# Altium footprint library TXU0202DCUR.PcbLib: 3 footprints
Each footprint in its own frame and in the unit in brackets; x right, y up, seen from the top. Pads: shape width x height; smd on the part's side, far side on the other; paste and mask are expansions set on the pad; w line width, h text height; cw(c..) or ccw(c..) is an arc to the next point about the centre after c.
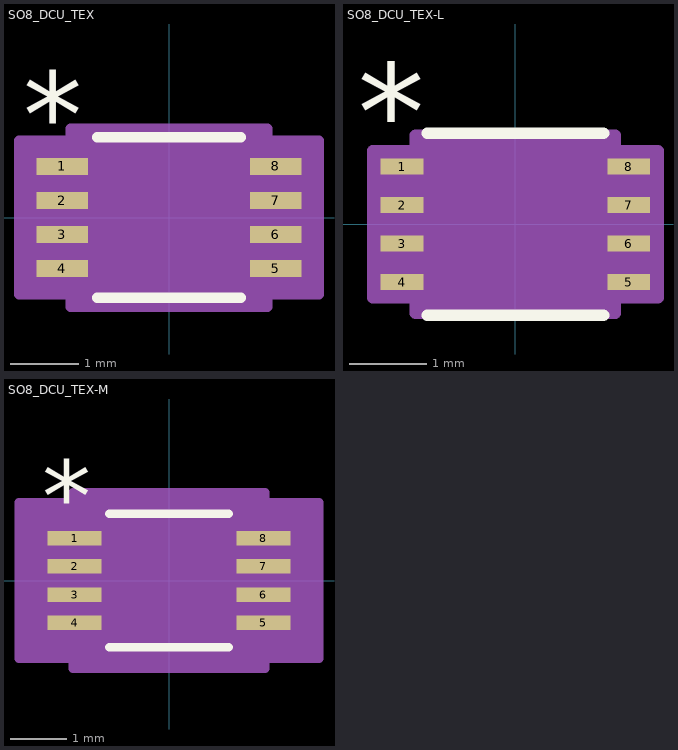
[diagram p0: the footprints below, top view; thin cyan lines are the x and y axes]

## SO8_DCU_TEX [mil]
pads (8):
  rect 29.78x10 smd paste+0 mask+0: 1(-61.89,29.54) 2(-61.89,9.85) 3(-61.89,-9.85) 4(-61.89,-29.54) 5(61.89,-29.54) 6(61.89,-9.85) 7(61.89,9.85) 8(61.89,29.54)
Top Overlay:
  lines w6: -41.67,-46.5 41.67,-46.5 ; -41.67,46.5 41.67,46.5
  text ".Designator" at -137.5,-25 h50
  text "*" at -84.39,34.53 h50
Mechanical 13:
  lines w1: -12,41.5 ccw(c0,41.5) 12,41.5 ; -63,-34.53 -63,-24.54 -47,-24.54 -47,-34.53 -63,-34.53 ; -63,-14.85 -63,-4.84 -47,-4.84 -47,-14.85 -63,-14.85 ; -63,4.84 -63,14.85 -47,14.85 -47,4.84 -63,4.84 ; -63,24.54 -63,34.53 -47,34.53 -47,24.54 -63,24.54 ; -47,-41.5 47,-41.5 47,41.5 -47,41.5 -47,-41.5 ; 47,-34.53 47,-24.54 63,-24.54 63,-34.53 47,-34.53 ; 47,-14.85 47,-4.84 63,-4.84 63,-14.85 47,-14.85 ; 47,4.84 47,14.85 63,14.85 63,4.84 47,4.84 ; 47,24.54 47,34.53 63,34.53 63,24.54 47,24.54
  text "*" at -44.5,-11.5 h50
  text ".Designator" at -137.5,-25 h50
Mechanical 15:
  region: -57,-44.53 -86.78,-44.53 -86.78,44.53 -57,44.53 -57,51.5 57,51.5 57,44.53 86.78,44.53 86.78,-44.53 57,-44.53 57,-51.5 -57,-51.5
  lines w6: -86.78,-44.53 -86.78,44.53 -57,44.53 -57,51.5 57,51.5 57,44.53 86.78,44.53 86.78,-44.53 57,-44.53 57,-51.5 -57,-51.5 -57,-44.53 -86.78,-44.53
3D body "SO8_DCU_TEX.step": height 35.12, standoff 0, extent -62.99,-41.5 62.99,41.5

## SO8_DCU_TEX-L [mil]
pads (8):
  rect 21.91x8.03 smd paste+0 mask+0: 1(-57.95,29.54) 2(-57.95,9.85) 3(-57.95,-9.85) 4(-57.95,-29.54) 5(57.95,-29.54) 6(57.95,-9.85) 7(57.95,9.85) 8(57.95,29.54)
Top Overlay:
  lines w6: -45.02,-46.5 45.02,-46.5 ; -45.02,46.5 45.02,46.5
  text ".Designator" at -137.5,-25 h50
  text "*" at -80.45,32.57 h50
Mechanical 13:
  lines w1: -12,41.5 ccw(c0,41.5) 12,41.5 ; -63,-34.53 -63,-24.54 -47,-24.54 -47,-34.53 -63,-34.53 ; -63,-14.85 -63,-4.84 -47,-4.84 -47,-14.85 -63,-14.85 ; -63,4.84 -63,14.85 -47,14.85 -47,4.84 -63,4.84 ; -63,24.54 -63,34.53 -47,34.53 -47,24.54 -63,24.54 ; -47,-41.5 47,-41.5 47,41.5 -47,41.5 -47,-41.5 ; 47,-34.53 47,-24.54 63,-24.54 63,-34.53 47,-34.53 ; 47,-14.85 47,-4.84 63,-4.84 63,-14.85 47,-14.85 ; 47,4.84 47,14.85 63,14.85 63,4.84 47,4.84 ; 47,24.54 47,34.53 63,34.53 63,24.54 47,24.54
  text "*" at -44.5,-11.5 h50
  text ".Designator" at -137.5,-25 h50
Mechanical 15:
  region: -51,-37.55 -72.91,-37.55 -72.91,37.55 -51,37.55 -51,45.5 51,45.5 51,37.55 72.91,37.55 72.91,-37.55 51,-37.55 51,-45.5 -51,-45.5
  lines w6: -72.91,-37.55 -72.91,37.55 -51,37.55 -51,45.5 51,45.5 51,37.55 72.91,37.55 72.91,-37.55 51,-37.55 51,-45.5 -51,-45.5 -51,-37.55 -72.91,-37.55
3D body "SO8_DCU_TEX.step": height 35.12, standoff 0, extent -62.99,-41.5 62.99,41.5

## SO8_DCU_TEX-M [mil]
pads (8):
  rect 37.65x10 smd paste+0 mask+0: 1(-65.83,29.54) 2(-65.83,9.85) 3(-65.83,-9.85) 4(-65.83,-29.54) 5(65.83,-29.54) 6(65.83,-9.85) 7(65.83,9.85) 8(65.83,29.54)
Top Overlay:
  lines w6: -41.67,-46.5 41.67,-46.5 ; -41.67,46.5 41.67,46.5
  text ".Designator" at -137.5,-25 h50
  text "*" at -88.33,34.53 h50
Mechanical 13:
  lines w1: -12,41.5 ccw(c0,41.5) 12,41.5 ; -63,-34.53 -63,-24.54 -47,-24.54 -47,-34.53 -63,-34.53 ; -63,-14.85 -63,-4.84 -47,-4.84 -47,-14.85 -63,-14.85 ; -63,4.84 -63,14.85 -47,14.85 -47,4.84 -63,4.84 ; -63,24.54 -63,34.53 -47,34.53 -47,24.54 -63,24.54 ; -47,-41.5 47,-41.5 47,41.5 -47,41.5 -47,-41.5 ; 47,-34.53 47,-24.54 63,-24.54 63,-34.53 47,-34.53 ; 47,-14.85 47,-4.84 63,-4.84 63,-14.85 47,-14.85 ; 47,4.84 47,14.85 63,14.85 63,4.84 47,4.84 ; 47,24.54 47,34.53 63,34.53 63,24.54 47,24.54
  text "*" at -44.5,-11.5 h50
  text ".Designator" at -137.5,-25 h50
Mechanical 15:
  region: -67,-54.53 -104.65,-54.53 -104.65,54.53 -67,54.53 -67,61.5 67,61.5 67,54.53 104.65,54.53 104.65,-54.53 67,-54.53 67,-61.5 -67,-61.5
  lines w6: -104.65,-54.53 -104.65,54.53 -67,54.53 -67,61.5 67,61.5 67,54.53 104.65,54.53 104.65,-54.53 67,-54.53 67,-61.5 -67,-61.5 -67,-54.53 -104.65,-54.53
3D body "SO8_DCU_TEX.step": height 35.12, standoff 0, extent -62.99,-41.5 62.99,41.5